# Altium footprint library 0603WAF1001T5E.PcbLib: 1 footprints
Each footprint in its own frame and in the unit in brackets; x right, y up, seen from the top. Pads: shape width x height; smd on the part's side, far side on the other; paste and mask are expansions set on the pad; w line width, h text height; cw(c..) or ccw(c..) is an arc to the next point about the centre after c.
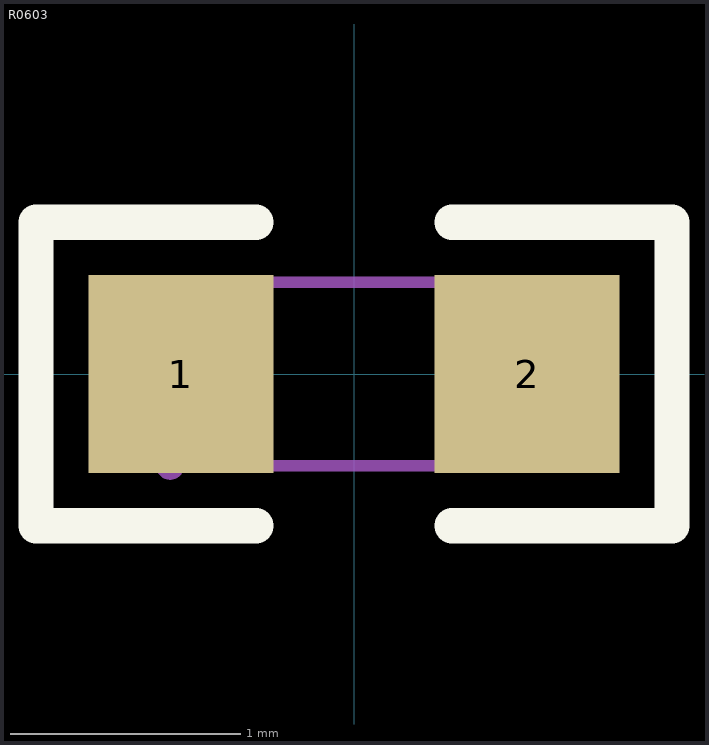
[diagram p0: the footprint, top view; thin cyan lines are the x and y axes]

## R0603 [mm]
pads (2):
  rect 0.806x0.864 smd paste-100 mask+0.051: 1(-0.753,0) 2(0.753,0)
Top Overlay:
  lines w0.152: -0.426,-0.661 -1.385,-0.661 -1.385,0.661 -0.426,0.661 ; 0.426,-0.661 1.385,-0.661 1.385,0.661 0.426,0.661
Top Paste:
  region: -1.195,-0.45 -0.395,-0.45 -0.345,-0.4 -0.345,-0.172 -0.715,-0.172 -0.715,0.158 -0.345,0.158 -0.345,0.4 -0.395,0.45 -1.195,0.45 -1.245,0.4 -1.245,-0.4
  region: 1.195,0.45 0.395,0.45 0.345,0.4 0.345,0.172 0.715,0.172 0.715,-0.158 0.345,-0.158 0.345,-0.4 0.395,-0.45 1.195,-0.45 1.245,-0.4 1.245,0.4
Mechanical 6:
  lines w0.051: -0.8,-0.4 0.8,-0.4 0.8,0.4 -0.8,0.4 -0.8,-0.4
Mechanical 8:
  region: -0.74,-0.4 -0.74,-0.405 -0.742,-0.414 -0.745,-0.423 -0.749,-0.431 -0.754,-0.439 -0.761,-0.446 -0.769,-0.451 -0.777,-0.456 -0.786,-0.459 -0.795,-0.46 -0.805,-0.46 -0.814,-0.459 -0.823,-0.456 -0.832,-0.451 -0.839,-0.446 -0.846,-0.439 -0.851,-0.431 -0.856,-0.423 -0.859,-0.414 -0.86,-0.405 -0.86,-0.4 -0.86,-0.395 -0.859,-0.386 -0.856,-0.377 -0.851,-0.369 -0.846,-0.361 -0.839,-0.354 -0.832,-0.349 -0.823,-0.344 -0.814,-0.342 -0.805,-0.34 -0.795,-0.34 -0.786,-0.342 -0.777,-0.344 -0.769,-0.349 -0.761,-0.354 -0.754,-0.361 -0.749,-0.369 -0.745,-0.377 -0.742,-0.386 -0.74,-0.395 -0.74,-0.4
Mechanical 9:
  region: 0.8,-0.4 0.8,0.4 0.5,0.4 0.5,-0.4
  region: -0.8,-0.4 -0.8,0.4 -0.5,0.4 -0.5,-0.4